# EAGLE library part RGBDIGIT_08" (library RGBDIGIT_08)
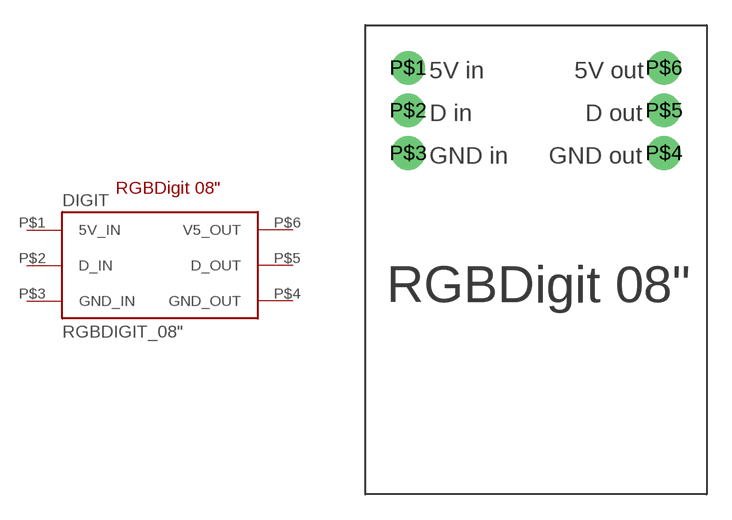
[diagram p0: symbol with the pads of RGBDIGIT_08"_6PIN; footprint RGBDIGIT_08"_6PIN]

Designator prefix DIGIT

## RGBDIGIT_08"  [RGBDIGIT_08"_6PIN]
P$1  5V_IN  pwr
P$2  D_IN  in
P$3  GND_IN  pwr
P$4  GND_OUT  pwr
P$5  D_OUT  out
P$6  V5_OUT  pwr

## Footprint RGBDIGIT_08"_6PIN (pad centres in mm)
drill 1 pad 2: P$1 -7.62,2.54; P$2 -7.62,0; P$3 -7.62,-2.54; P$4 7.62,-2.54; P$5 7.62,0; P$6 7.62,2.54